# Altium footprint library PcbLib.PcbLib: 162 footprints (part 4 of 11)
Each footprint in its own frame and in the unit in brackets; x right, y up, seen from the top. Pads: shape width x height; smd on the part's side, far side on the other; paste and mask are expansions set on the pad; w line width, h text height; cw(c..) or ccw(c..) is an arc to the next point about the centre after c.
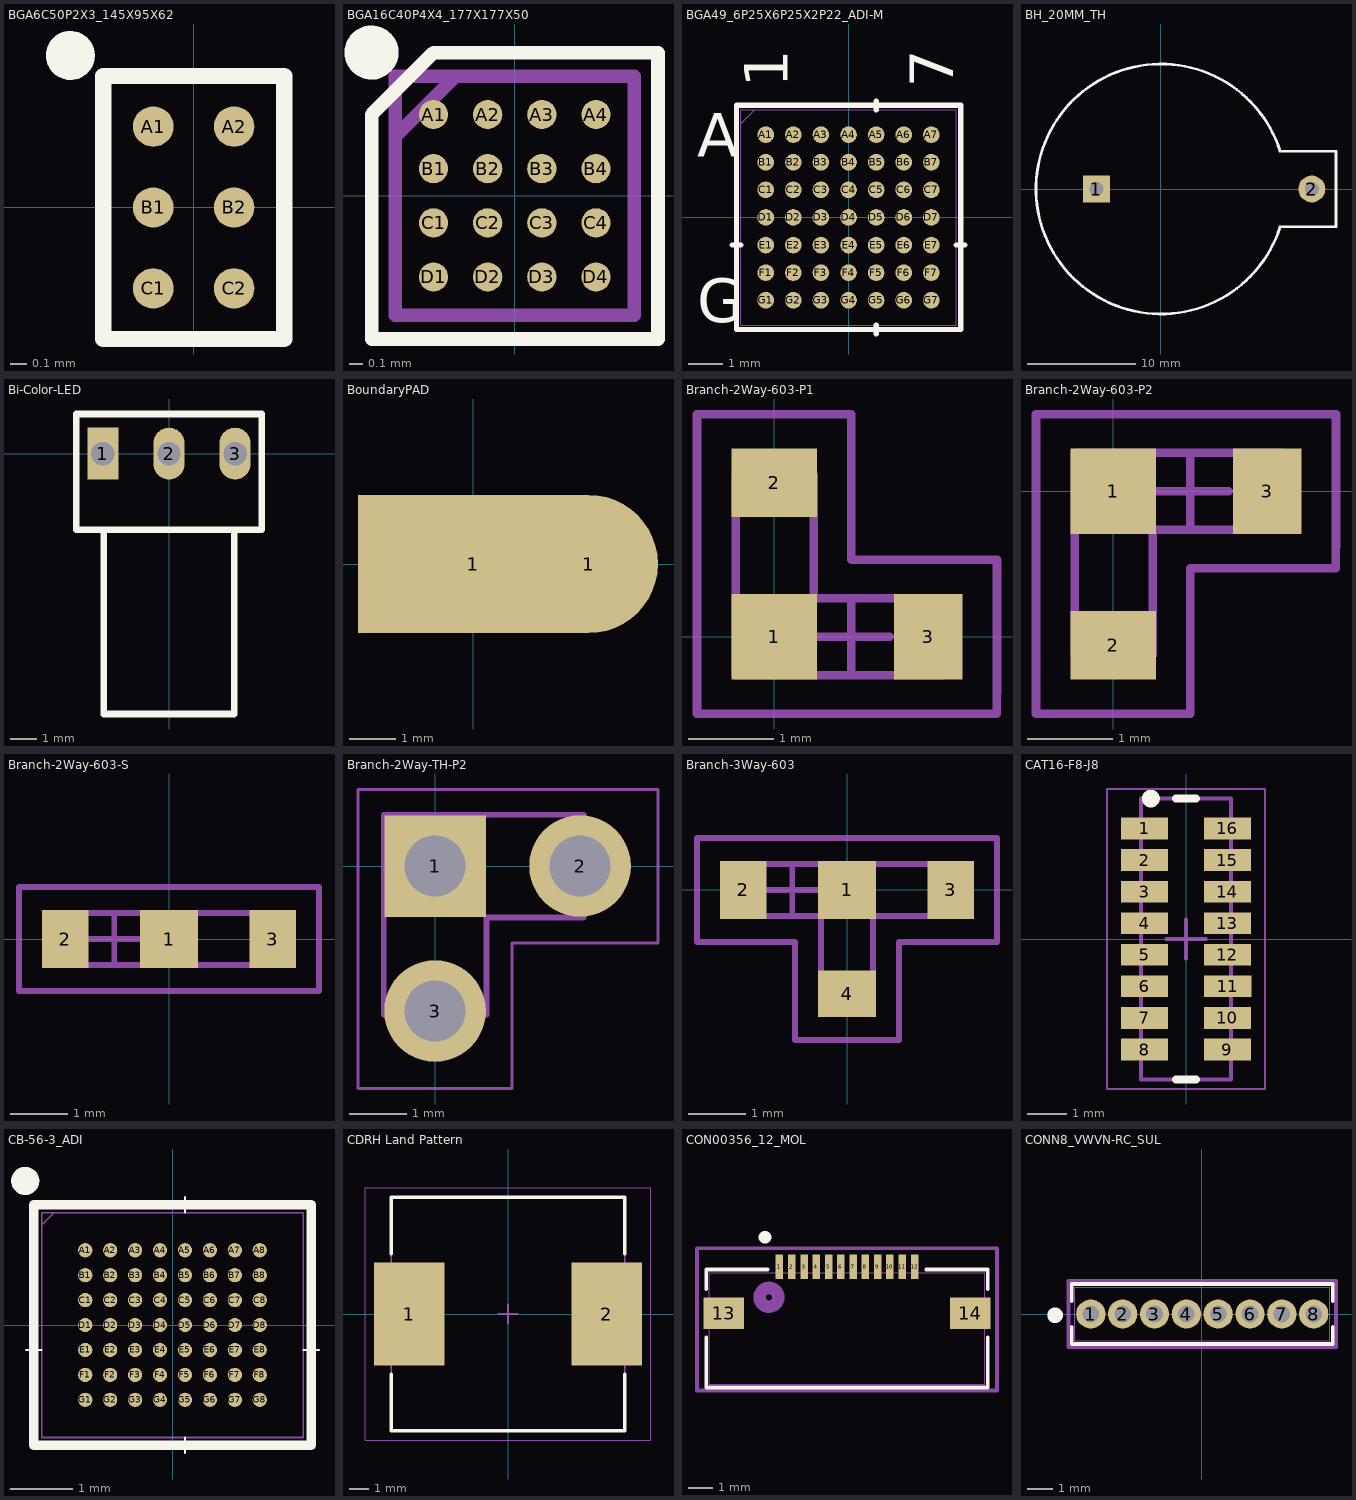
[diagram p3: the footprints below, top view; thin cyan lines are the x and y axes]

## BGA6C50P2X3_145X95X62 [mm]
pads (6):
  round 0.25 smd mask+0.089: A1(-0.25,0.5) A2(0.25,0.5) B1(-0.25,0) B2(0.25,0) C1(-0.25,-0.5) C2(0.25,-0.5)
Top Overlay:
  circle w0.1: c-0.762,0.94 r0.025
  circle w0.1: c-0.762,0.94 r0.102
  lines w0.102: -0.559,-0.813 -0.559,0.813 0.559,0.813 0.559,-0.813 -0.559,-0.813
Mechanical 13:
  circle w0.1: c-0.25,0.5 r0.05
3D body "CSD75208W1015.stp": height 0.63, standoff 0, extent -0.475,-0.725 0.475,0.725

## BGA16C40P4X4_177X177X50 [mm]
pads (16):
  round 0.216 smd mask+0.064: A1(-0.6,0.6) A2(-0.2,0.6) A3(0.2,0.6) A4(0.6,0.6) B1(-0.6,0.2) B2(-0.2,0.2) B3(0.2,0.2) B4(0.6,0.2) C1(-0.6,-0.2) C2(-0.2,-0.2) C3(0.2,-0.2) C4(0.6,-0.2) D1(-0.6,-0.6) D2(-0.2,-0.6) D3(0.2,-0.6) D4(0.6,-0.6)
Top Overlay:
  circle w0.2: c-1.058,1.058 r0.1
  lines w0.1: -1.058,-1.058 1.058,-1.058 1.058,1.058 -0.6,1.058 -1.058,0.6 -1.058,-1.058
Mechanical 13:
  lines w0.1: -0.884,0.436 -0.436,0.884 ; -0.884,-0.884 0.884,-0.884 0.884,0.884 -0.884,0.884 -0.884,-0.884
3D body "MAX17270ENE+T.stp": height 0.5, standoff 0, extent -0.884,-0.884 0.884,0.884

## BGA49_6P25X6P25X2P22_ADI-M [mil]
pads (49):
  round 19 smd paste+0 mask+0: A1(-94.49,94.49) A2(-62.99,94.49) A3(-31.5,94.49) A4(0,94.49) A5(31.5,94.49) A6(62.99,94.49) A7(94.49,94.49) B1(-94.49,62.99) B2(-62.99,62.99) B3(-31.5,62.99) B4(0,62.99) B5(31.5,62.99) B6(62.99,62.99) B7(94.49,62.99) C1(-94.49,31.5) C2(-62.99,31.5) C3(-31.5,31.5) C4(0,31.5) C5(31.5,31.5) C6(62.99,31.5) C7(94.49,31.5) D1(-94.49,0) D2(-62.99,0) D3(-31.5,0) D4(0,0) D5(31.5,0) D6(62.99,0) D7(94.49,0) E1(-94.49,-31.5) E2(-62.99,-31.5) E3(-31.5,-31.5) E4(0,-31.5) E5(31.5,-31.5) E6(62.99,-31.5) E7(94.49,-31.5) F1(-94.49,-62.99) F2(-62.99,-62.99) F3(-31.5,-62.99) F4(0,-62.99) F5(31.5,-62.99) F6(62.99,-62.99) F7(94.49,-62.99) G1(-94.49,-94.49) G2(-62.99,-94.49) G3(-31.5,-94.49) G4(0,-94.49) G5(31.5,-94.49) G6(62.99,-94.49) G7(94.49,-94.49)
Top Overlay:
  lines w6: -133,-31.5 -123,-31.5 ; 31.5,-133 31.5,-123 ; 31.5,123 31.5,133 ; 123,-31.5 133,-31.5 ; -128,-128 -128,128 128,128 128,-128 -128,-128
  text "7" at 119.49,148 h50
  text "1" at -69.49,148 h50
  text "G" at -173,-119.49 h50
  text "A" at -173,69.49 h50
Bottom Overlay:
  text "A" at -148,69.49 h50
  text "7" at 69.49,148 h50
  text "1" at -119.49,148 h50
  text "G" at -148,-119.49 h50
Mechanical 13:
  lines w1: -123,107.25 -107.25,123 ; -123,-123 -123,123 123,123 123,-123 -123,-123
  text "7" at 119.49,148 h50
  text "1" at -69.49,148 h50
  text "G" at -173,-119.49 h50
  text "A" at -173,69.49 h50
3D body "BGA49_6P25X6P25X2P22_ADI.step": height 95.12, standoff -0.02, extent -122.99,-122.99 122.99,122.99

## BH_20MM_TH [mm] "20mm Through Hole Battery Holder"
height 8.8
pads (2):
  rect 2.5x2.5 hole 1.3: 1(-6,0)
  round 2.5 hole 1.3: 2(14,0)
Top Overlay:
  lines w0.254: 11.042,-3.5 16.242,-3.5 16.242,3.5 11.042,3.5 ; 11.058,-3.505 cw(c0,0) 11.058,3.505
3D body "User Library-20mm_coin_holder.STEP": height 8.67, standoff -3.5, extent -10.738,-11.5 16.693,11.5

## Bi-Color-LED [mm] "Bi Color LED Lamp"
height 2
pads (3):
  rect 1.2x2 hole 0.9: 1(-2.54,0)
  oval 1.2x2 hole 0.9: 2(0,0) 3(2.54,0)
Top Overlay:
  lines w0.254: -2.5,-3 -2.5,-10 2.5,-10 2.5,-3 ; -3.556,-2.921 3.556,-2.921 3.556,1.524 -3.556,1.524 -3.556,-2.921

## BoundaryPAD [mm] "Pad For Connecting Interfaces"
pads (2):
  rect 5x3 smd: 1(0,0)
  round 3 smd: 1(2.5,0)

## Branch-2Way-603-P1 [mm] "Resistive Branch, 3-Leads, Body 1.60x0.80mm, IPC Low Density"
height 0.6
pads (3):
  rect 1x1 smd: 1(0,0)
  rect 1x0.8 smd: 2(0,1.8)
  rect 0.8x1 smd: 3(1.8,0)
Mechanical 13:
  lines w0.1: 0.464,0.436 0.464,1.89 -0.45,1.89 -0.45,-0.45 1.966,-0.45 1.966,0.45 0.464,0.45
Mechanical 15:
  lines w0.05: -0.9,-0.9 2.6,-0.9 2.6,0.889 0.9,0.889 ; -0.9,-0.899 -0.9,2.6 0.9,2.6 0.9,0.9
  lines w0.1: 0.45,0 1.35,0 ; 0.9,-0.45 0.9,0.45
Mechanical 29:
  lines w0.1: 2.6,0.9 0.9,0.9 0.9,2.6 -0.9,2.6 -0.9,-0.9 2.435,-0.9 2.6,-0.9 2.6,-0.65 2.601,-0.649 2.601,0.9
3D body "SW3dPS-0603 SMD Resistor.STEP": height 0.3, standoff 0, extent 0.1,-0.4 1.7,0.4

## Branch-2Way-603-P2 [mm] "Resistive Branch, 3-Leads, Body 1.60x0.80mm, IPC Low Density"
height 0.6
pads (3):
  rect 1x1 smd: 1(0,0)
  rect 1x0.8 smd: 2(0,-1.8)
  rect 0.8x1 smd: 3(1.8,0)
Mechanical 13:
  lines w0.1: -0.45,-1.9 -0.45,0.44 ; -0.45,-1.89 0.464,-1.89 ; -0.45,0.45 1.966,0.45 1.966,-0.45 0.464,-0.45 ; 0.464,-1.914 0.464,-0.46
Mechanical 15:
  lines w0.05: 2.6,0.889 2.6,-0.9 0.9,-0.9 0.9,-2.6 -0.9,-2.6 -0.9,0.9 2.6,0.9
  lines w0.1: 0.45,0 1.35,0 ; 0.9,-0.45 0.9,0.45
Mechanical 29:
  lines w0.1: 2.6,0.9 -0.9,0.9 -0.9,-2.6 0.9,-2.6 0.9,-0.9 2.435,-0.9 2.6,-0.9 2.6,-0.65 2.601,-0.649 2.601,0.9
3D body "SW3dPS-0603 SMD Resistor.STEP": height 0.3, standoff 0, extent 0.1,-0.4 1.7,0.4

## Branch-2Way-603-S [mm] "Resistive Branch, 3-Leads, Body 1.60x0.80mm, IPC Low Density"
height 0.6
pads (3):
  rect 1x1 smd: 1(0,0)
  rect 0.8x1 smd: 2(-1.8,0) 3(1.8,0)
Mechanical 13:
  lines w0.1: -0.066,0.45 1.966,0.45 1.966,-0.45 0.45,-0.45 -0.45,-0.45 -1.966,-0.45 -1.966,0.45 0.066,0.45
Mechanical 15:
  lines w0.05: 0.699,0.889 2.6,0.889 2.6,-0.9 0.9,-0.9 -0.9,-0.9 -0.9,-0.899 -2.601,-0.899 -2.601,0.889 0.701,0.889
  lines w0.1: -1.4,0 -0.5,0 ; -0.95,-0.45 -0.95,0.45
Mechanical 29:
  lines w0.1: 2.6,0.9 -2.6,0.9 -2.6,-0.9 -0.9,-0.9 0.9,-0.9 2.601,-0.9 2.601,0.9
3D body "SW3dPS-0603 SMD Resistor.STEP": height 0.3, standoff 0, extent -1.75,-0.4 -0.15,0.4

## Branch-2Way-TH-P2 [mil] "Resistive Branch, 3-Holes, Body 1.60x0.80mm, IPC Low Density"
height 23.62
pads (3):
  rect 70x70 hole 42: 1(0,0)
  round 70 hole 42: 2(100,0) 3(0,-100)
Mechanical 15:
  lines w1.97: -53.15,-153.54 53.15,-153.54 53.15,-53.15 153.78,-53.15 153.78,52.91 -53.15,52.91 -53.15,-153.54
Mechanical 29:
  lines w3.94: 102.36,35.43 -35.43,35.43 -35.43,-102.36 35.43,-102.36 35.43,-35.43 95.88,-35.43 102.36,-35.43 102.36,-25.59 102.4,-25.55 102.4,35.43

## Branch-3Way-603 [mm] "Resistive Branch, 4-Leads, Body 1.60x0.80mm, IPC Low Density"
height 0.6
pads (4):
  rect 1x1 smd: 1(0,0)
  rect 0.8x1 smd: 2(-1.8,0) 3(1.8,0)
  rect 1x0.8 smd: 4(0,-1.8)
Mechanical 13:
  lines w0.1: -0.066,0.45 1.966,0.45 1.966,-0.45 0.45,-0.45 0.45,-1.95 -0.45,-1.95 -0.45,-0.45 -1.966,-0.45 -1.966,0.45 0.066,0.45
Mechanical 15:
  lines w0.05: 0.699,0.889 2.6,0.889 2.6,-0.9 0.9,-0.9 0.9,-2.6 -0.9,-2.6 -0.9,-0.899 -2.601,-0.899 -2.601,0.889 0.701,0.889
  lines w0.1: -1.4,0 -0.5,0 ; -0.95,-0.45 -0.95,0.45
Mechanical 29:
  lines w0.1: 2.6,0.9 -2.6,0.9 -2.6,-0.9 -0.9,-0.9 -0.9,-2.6 0.9,-2.6 0.9,-1.9 0.9,-0.9 2.601,-0.9 2.601,0.9
3D body "SW3dPS-0603 SMD Resistor.STEP": height 0.3, standoff 0, extent -1.75,-0.4 -0.15,0.4

## CAT16-F8-J8 [mm] "CHIP ARRAY RES, 16-Leads, Body 6.40x1.30mm, Pitch 0.8mm, IPC Low Density"
height 7.5
pads (16):
  rect 1.2x0.55 smd: 1(-1.05,2.8) 2(-1.05,2) 3(-1.05,1.2) 4(-1.05,0.4) 5(-1.05,-0.4) 6(-1.05,-1.2) 7(-1.05,-2) 8(-1.05,-2.8) 9(1.05,-2.8) 10(1.05,-2) 11(1.055,-1.2) 12(1.05,-0.4) 13(1.05,0.4) 14(1.05,1.2) 15(1.05,2) 16(1.05,2.8)
Top Overlay:
  circle w0.25: c-0.889,3.556 r0.1
  lines w0.2: -0.254,-3.556 0.254,-3.556 ; -0.254,3.556 0.254,3.556
Mechanical 13:
  lines w0.1: -1.143,-3.556 -1.143,3.556 1.143,3.556 1.143,-3.556 -1.143,-3.556
Mechanical 15:
  lines w0.05: -2,-3.8 -2,3.8 2,3.8 2,-3.8 -2,-3.8
  lines w0.1: -0.5,0 0.5,0 ; 0,-0.5 0,0.5
3D body: height 0.75, standoff 0, extent -1.143,-3.556 1.143,3.556

## CB-56-3_ADI [mil]
pads (56):
  round 9 smd paste+0 mask+2: A1(-55.12,47.24) A2(-39.37,47.24) A3(-23.62,47.24) A4(-7.87,47.24) A5(7.87,47.24) A6(23.62,47.24) A7(39.37,47.24) A8(55.12,47.24) B1(-55.12,31.5) B2(-39.37,31.5) B3(-23.62,31.5) B4(-7.87,31.5) B5(7.87,31.5) B6(23.62,31.5) B7(39.37,31.5) B8(55.12,31.5) C1(-55.12,15.75) C2(-39.37,15.75) C3(-23.62,15.75) C4(-7.87,15.75) C5(7.87,15.75) C6(23.62,15.75) C7(39.37,15.75) C8(55.12,15.75) D1(-55.12,0) D2(-39.37,0) D3(-23.62,0) D4(-7.87,0) D5(7.87,0) D6(23.62,0) D7(39.37,0) D8(55.12,0) E1(-55.12,-15.75) E2(-39.37,-15.75) E3(-23.62,-15.75) E4(-7.87,-15.75) E5(7.87,-15.75) E6(23.62,-15.75) E7(39.37,-15.75) E8(55.12,-15.75) F1(-55.12,-31.5) F2(-39.37,-31.5) F3(-23.62,-31.5) F4(-7.87,-31.5) F5(7.87,-31.5) F6(23.62,-31.5) F7(39.37,-31.5) F8(55.12,-31.5) G1(-55.12,-47.24) G2(-39.37,-47.24) G3(-23.62,-47.24) G4(-7.87,-47.24) G5(7.87,-47.24) G6(23.62,-47.24) G7(39.37,-47.24) G8(55.12,-47.24)
Top Overlay:
  circle w9.84: c-93,91 r3.94
  lines w1: -92.5,-15.75 -82.5,-15.75 ; 7.87,-81 7.87,-71 ; 7.87,71 7.87,81 ; 82.5,-15.75 92.5,-15.75
  lines w6: -87.5,-76 87.5,-76 87.5,76 -87.5,76 -87.5,-76
Mechanical 13:
  lines w1: -82.5,63.13 -74.63,71 ; -82.5,-71 82.5,-71 82.5,71 -82.5,71 -82.5,-71
3D body "CB-56-3_ADI.step": height 22.09, standoff 0.01, extent -83,-70.98 82.04,70.98

## CDRH Land Pattern [mm] "Precision Wire Wound Inductor, 2-Leads, Body 12.15x12.15mm, IPC Low Density"
height 8
pads (2):
  rect 3.7x5.4 smd: 1(-5.2,0) 2(5.2,0)
Top Overlay:
  lines w0.2: -6.15,-3.175 -6.15,-6.15 6.15,-6.15 6.15,-3.175 ; -6.15,3.175 -6.15,6.15 6.15,6.15 6.15,3.175
Mechanical 13:
  lines w0.1: -6.15,-6.15 6.15,-6.15 6.15,6.15 -6.15,6.15 -6.15,-6.15
Mechanical 15:
  lines w0.05: -7.525,-6.65 7.525,-6.65 7.525,6.65 -7.525,6.65 -7.525,-6.65
  lines w0.1: -0.5,0 0.5,0 ; 0,-0.5 0,0.5
3D body "SUMIDA-CDRH125-DEFAULT.STEP": height 6.23, standoff -0.02, extent -6.171,-6 6.171,6

## CON00356_12_MOL [mil]
pads (14):
  rect 12x39 smd paste+0 mask+0: 1(-383.27,-2861.02) 2(-363.58,-2861.02) 3(-343.9,-2861.02) 4(-324.21,-2861.02) 5(-304.53,-2861.02) 6(-284.84,-2861.02) 7(-265.16,-2861.02) 8(-245.47,-2861.02) 9(-225.79,-2861.02) 10(-206.1,-2861.02) 11(-186.42,-2861.02) 12(-166.73,-2861.02)
  rect 65x51 smd: 13(-472.83,-2935.55) 14(-77.17,-2935.55)
Top Overlay:
  lines w6: -500.47,-2974.15 -500.47,-3054.5 -49.53,-3054.5 -49.53,-2974.15 ; -500.47,-2896.95 -500.47,-2865.5 -402.6,-2865.5 ; -147.4,-2865.5 -49.53,-2865.5 -49.53,-2896.95
  lines w20: -407,-2814 cw(c-407.04,-2829) -406.04,-2814.03
Mechanical 13:
  circle w20: c-400,-2910 r15
  lines w1: -495.47,-3049.5 -54.53,-3049.5 -54.53,-2870.5 -495.47,-2870.5 -495.47,-3049.5
Mechanical 15:
  lines w6: -515.47,-3059.5 -515.47,-2831.5 -34.53,-2831.5 -34.53,-3059.5 -515.47,-3059.5
3D body: height 10, standoff 0, extent -275,-2960 -265,-2950
3D body "545481271.stp": height 46.17, standoff -1.07, extent -494.95,-3053.42 -54,-2856.58

## CONN8_VWVN-RC_SUL [mil]
pads (8):
  round 46 hole 26 mask+0: 1(-174,0) 2(-124,0) 3(-74,0) 4(-24,0) 5(26,0) 6(76,0) 7(126,0) 8(176,0)
Top Overlay:
  circle w20: c-230,-2 r2.24
  lines w6: -204,-20.08 -204,-47 206,-47 206,-20.08 ; -204,20.08 -204,47 206,47 206,20.08
Bottom Overlay:
  lines w20: -230.07,-1.49 ccw(c-245,0) -230,0
Mechanical 13:
  lines w1: -199,-42 201,-42 201,42 -199,42 -199,-42
Mechanical 15:
  lines w6: -209,-52 -209,52 211,52 211,-52 -209,-52
3D body "_ _ _B081VWVN-RC.STEP": height 157.98, standoff -90.05, extent -199,-43.25 201,41
3D body: height 10, standoff 0, extent -174,0 -164,10